# Altium schematic symbol library 2019-12-02_14-04-43.SchLib: 2 symbols
Pins are listed as number, name and electrical type; pins without a type are passive.

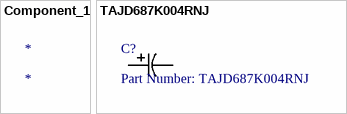
[diagram p0: symbols Component_1 to TAJD687K004RNJ]

## Component_1
designator *

## TAJD687K004RNJ
designator C?, comment Part Number: TAJD687K004RNJ
No Description Available; Vendor: AVX Corporation; Built_By: EMA_UL_Team; Type: DEV; Manufacturer_Part_Number: TAJD687K004RNJ; Copyright: Copyright (C) 2018 Accelerated Designs. All rights reserved; RefDes: RefDes; Value: Value
footprint TAJD
pins: 1, 2